# Altium footprint library NET_TIE.PcbLib: 1 footprints
Each footprint in its own frame and in the unit in brackets; x right, y up, seen from the top. Pads: shape width x height; smd on the part's side, far side on the other; paste and mask are expansions set on the pad; w line width, h text height; cw(c..) or ccw(c..) is an arc to the next point about the centre after c.
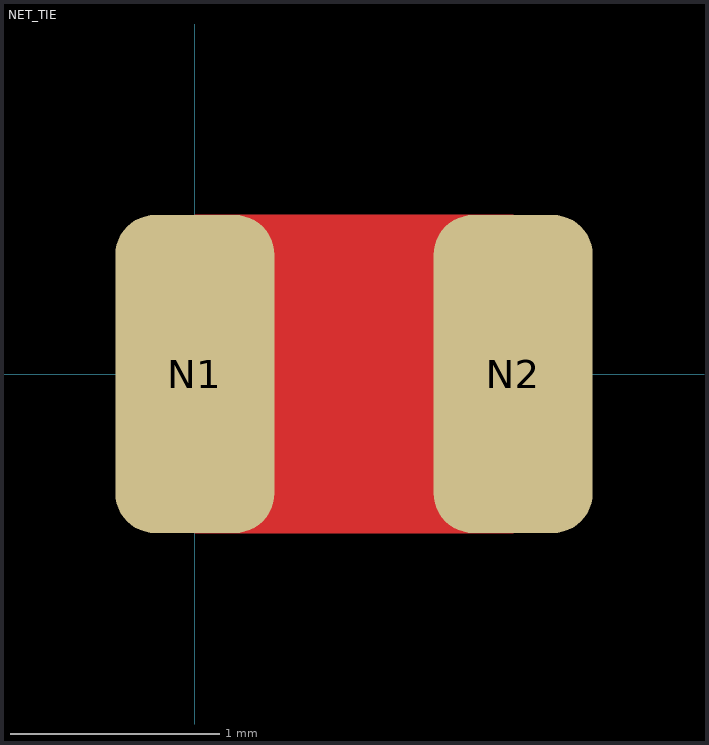
[diagram p0: the footprint, top view; thin cyan lines are the x and y axes]

## NET_TIE [mil]
pads (2):
  rrect50% 30x60 smd paste-30 mask+0: N1(0,0) N2(60,0)
Top Layer:
  region: 0,30 60,30 60,-30 0,-30